# Altium footprint library TO254P470X1016X1965-3P.PcbLib: 1 footprints
Each footprint in its own frame and in the unit in brackets; x right, y up, seen from the top. Pads: shape width x height; smd on the part's side, far side on the other; paste and mask are expansions set on the pad; w line width, h text height; cw(c..) or ccw(c..) is an arc to the next point about the centre after c.
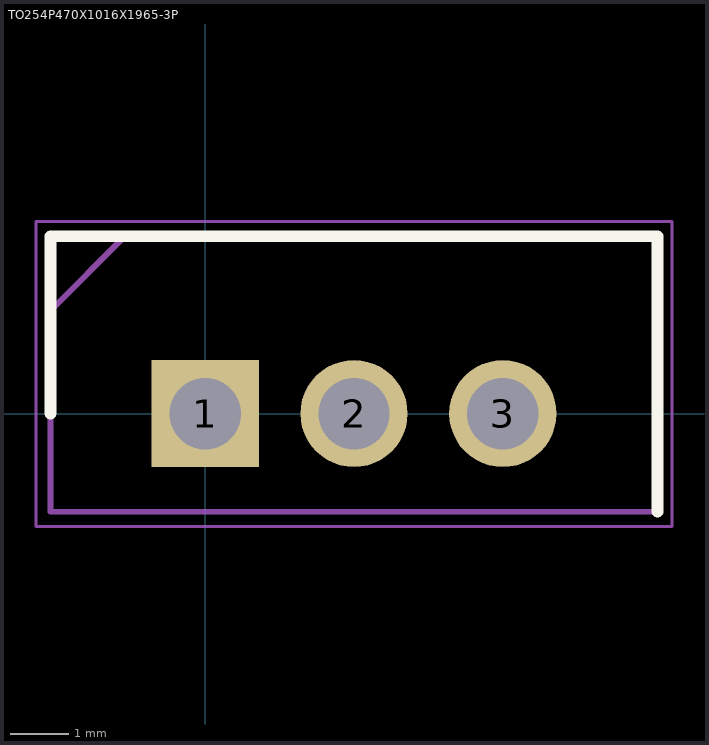
[diagram p0: the footprint, top view; thin cyan lines are the x and y axes]

## TO254P470X1016X1965-3P [mm]
pads (3):
  rect 1.83x1.83 / inner round 1.83 / far side rect 1.83x1.83 hole 1.22: 1(0,0)
  round 1.83 hole 1.22: 2(2.54,0) 3(5.08,0)
Top Overlay:
  lines w0.2: -2.64,0 -2.64,3.025 7.72,3.025 7.72,-1.675
Mechanical 15:
  lines w0.1: -2.64,1.755 -1.37,3.025 ; -2.64,-1.675 7.72,-1.675 7.72,3.025 -2.64,3.025 -2.64,-1.675
Mechanical 20:
  lines w0.05: -2.89,-1.925 7.97,-1.925 7.97,3.275 -2.89,3.275 -2.89,-1.925